# Altium footprint library PcbLib.PcbLib: 162 footprints (part 3 of 11)
Each footprint in its own frame and in the unit in brackets; x right, y up, seen from the top. Pads: shape width x height; smd on the part's side, far side on the other; paste and mask are expansions set on the pad; w line width, h text height; cw(c..) or ccw(c..) is an arc to the next point about the centre after c.
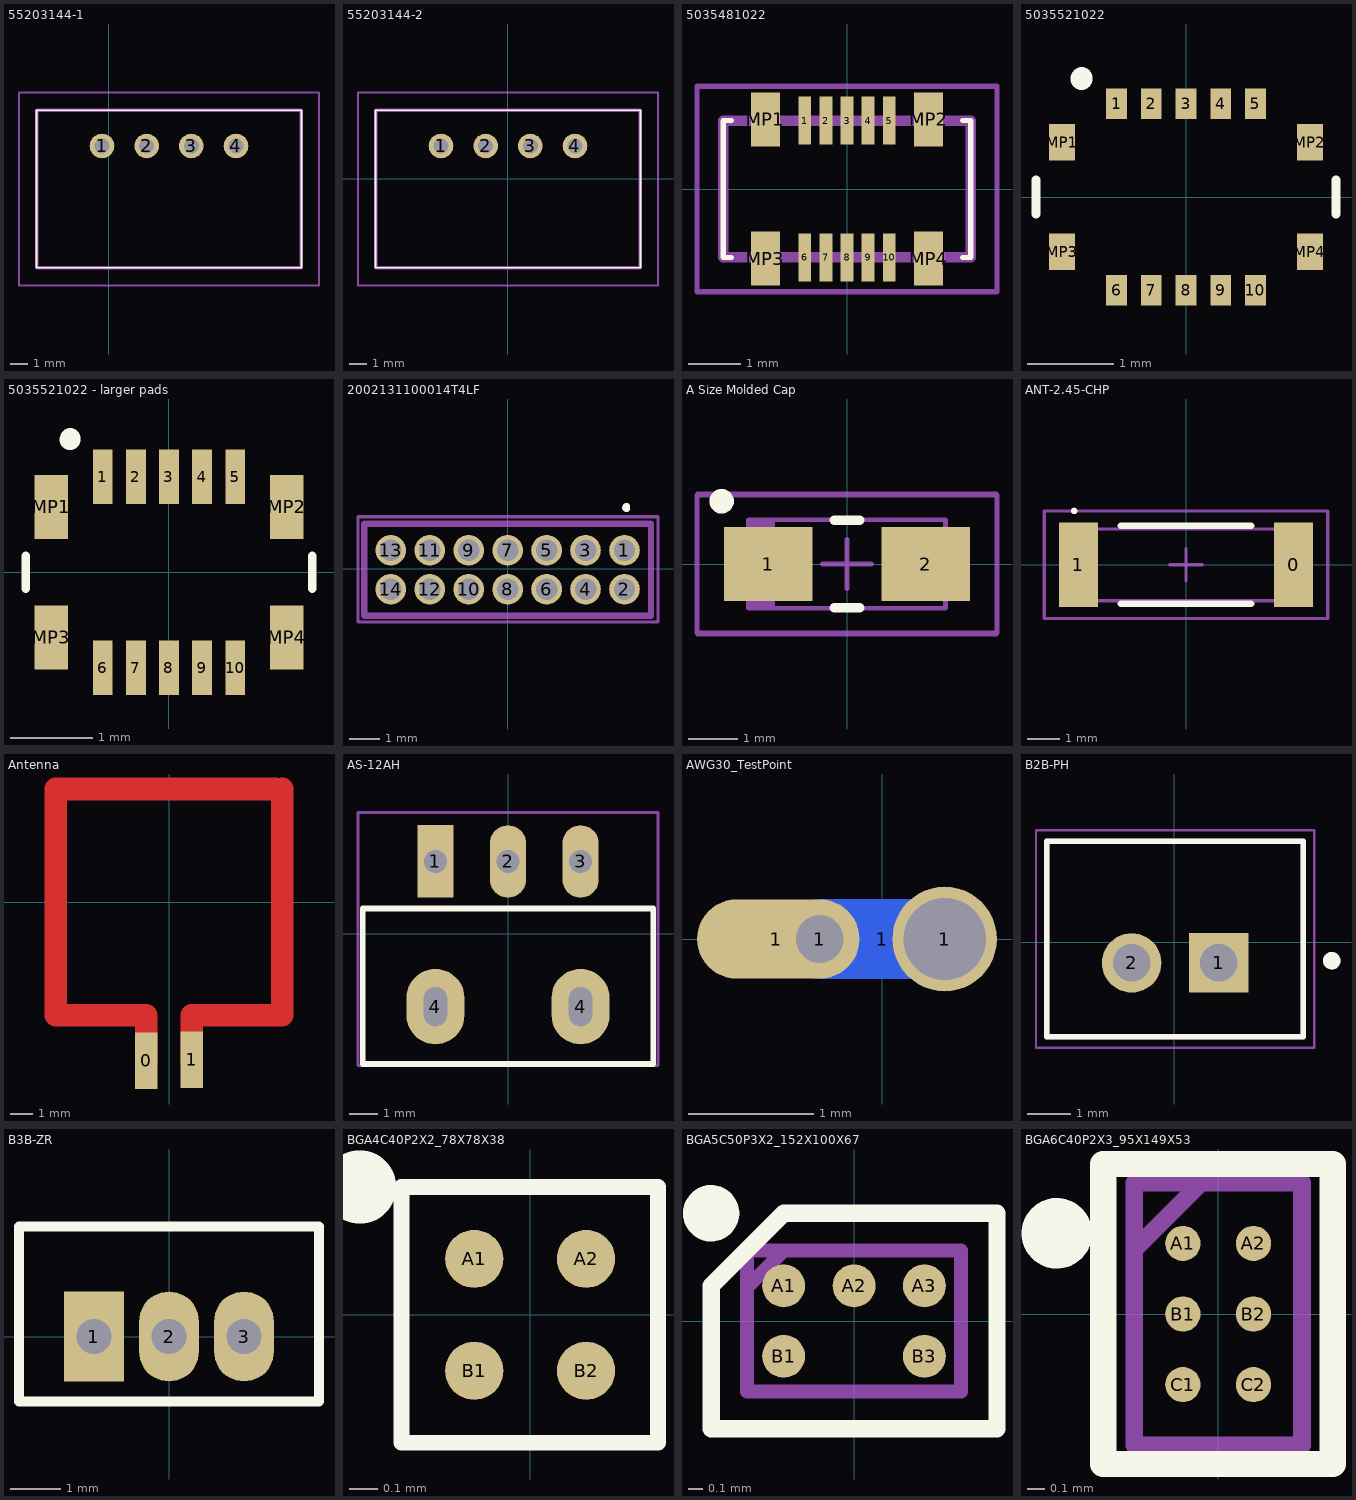
[diagram p2: the footprints below, top view; thin cyan lines are the x and y axes]

## 55203144-1 [mil]
pads (4):
  round 55 hole 33.86: 1(-15,-805) 2(85,-805) 3(185,-805) 4(285,-805)
Top Overlay:
  lines w3.94: -161.46,-1077.83 431.46,-1077.83 431.46,-724.84 -161.46,-724.84 -161.46,-1077.83
Mechanical 13:
  lines w7.87: -161.46,-1077.83 431.46,-1077.83 431.46,-724.84 -161.46,-724.84 -161.46,-1077.83
Mechanical 15:
  lines w3.94: -200.83,-1117.2 470.83,-1117.2 470.83,-685.47 -200.83,-685.47 -200.83,-1117.2
3D body "c-5-520314-4-y-3d.stp": height 173.5, standoff -99.5, extent -155.97,-1082.99 421.98,-725

## 55203144-2 [mil]
pads (4):
  round 55 hole 33.86: 1(-149,73) 2(-49,73) 3(51,73) 4(151,73)
Top Overlay:
  lines w3.94: -295.46,-199.83 297.46,-199.83 297.46,153.16 -295.46,153.16 -295.46,-199.83
Mechanical 13:
  lines w7.87: -295.46,-199.83 297.46,-199.83 297.46,153.16 -295.46,153.16 -295.46,-199.83
Mechanical 15:
  lines w3.94: -334.83,-239.2 336.83,-239.2 336.83,192.53 -334.83,192.53 -334.83,-239.2
3D body "DS1020-03RT1D--3DModel-STEP-56544.STEP": height 177.67, standoff -117.61, extent -206.48,-159.87 308.49,105.88

## 5035481022 [mm]
pads (14):
  rect 0.24x0.907 smd: 1(-0.8,1.301) 2(-0.4,1.301) 3(0,1.301) 4(0.4,1.301) 5(0.8,1.301) 6(-0.8,-1.301) 7(-0.4,-1.301) 8(0,-1.301) 9(0.4,-1.301) 10(0.8,-1.301)
  rect 0.551x1.029 smd: MP1(-1.549,1.321) MP2(1.549,1.321) MP3(-1.549,-1.321) MP4(1.549,-1.321)
Top Overlay:
  lines w0.1: -2.2,-1.3 -2.35,-1.3 -2.35,1.3 -2.2,1.3 ; 2.2,-1.3 2.35,-1.3 2.35,1.3 2.2,1.3
Mechanical 13:
  lines w0.2: -2.35,-1.3 -2.35,1.3 2.35,1.3 2.35,-1.3 -2.35,-1.3
Mechanical 15:
  lines w0.1: -2.85,-1.95 -2.85,1.95 2.85,1.95 2.85,-1.95 -2.85,-1.95
3D body "503548-1022.stp": height 0.68, standoff 0, extent -2.35,-1.3 2.35,1.3

## 5035521022 [mm]
pads (14):
  rect 0.24x0.35 smd mask+0.051: 1(-0.8,1.075) 2(-0.4,1.075) 3(0,1.075) 4(0.4,1.075) 5(0.8,1.075) 6(-0.8,-1.075) 7(-0.4,-1.075) 8(0,-1.075) 9(0.4,-1.075) 10(0.8,-1.075)
  rect 0.3x0.42 smd: MP1(-1.43,0.63) MP2(1.43,0.63) MP3(-1.43,-0.63) MP4(1.43,-0.63)
Top Overlay:
  lines w0.1: -1.73,-0.2 -1.73,0.2 ; 1.73,-0.2 1.73,0.2
  lines w0.25: -1.206,1.358 ccw(c-1.263,1.376) -1.204,1.376
3D body "503552-1022.stp": height 0.58, standoff 0, extent -1.73,-1.1 1.73,1.1

## 5035521022 - larger pads [mm]
pads (14):
  rect 0.24x0.655 smd mask+0.051: 1(-0.8,1.151) 2(-0.4,1.151) 3(0,1.151) 4(0.4,1.151) 5(0.8,1.151) 6(-0.8,-1.151) 7(-0.4,-1.151) 8(0,-1.151) 9(0.4,-1.151) 10(0.8,-1.151)
  rect 0.402x0.776 smd: MP1(-1.422,0.787) MP2(1.422,0.787) MP3(-1.422,-0.787) MP4(1.422,-0.787)
Top Overlay:
  lines w0.1: -1.73,-0.2 -1.73,0.2 ; 1.73,-0.2 1.73,0.2
  lines w0.25: -1.194,1.6 ccw(c-1.251,1.617) -1.191,1.617
3D body "503552-1022.stp": height 0.58, standoff 0, extent -1.73,-1.1 1.73,1.1

## 2002131100014T4LF [mm]
pads (14):
  round 1 hole 0.7: 1(3.81,0.61) 2(3.81,-0.66) 3(2.54,0.61) 4(2.54,-0.66) 5(1.27,0.61) 6(1.27,-0.66) 7(0,0.61) 8(0,-0.66) 9(-1.27,0.61) 10(-1.27,-0.66) 11(-2.54,0.61) 12(-2.54,-0.66) 13(-3.81,0.61) 14(-3.81,-0.66)
Top Overlay:
  lines w0.2: 3.886,1.952 cw(c3.886,2.002) 3.886,2.052 ; 3.886,1.952 cw(c3.886,2.002) 3.886,2.052 ; 3.886,1.952 3.886,2.052
Mechanical 13:
  lines w0.2: -4.675,-1.525 -4.675,1.475 4.675,1.475 4.675,-1.525 -4.675,-1.525
Mechanical 15:
  lines w0.1: -4.877,-1.727 -4.877,1.702 4.902,1.702 4.902,-1.727 -4.877,-1.727
3D body "20021311-0014XXLFc.stp": height 3.91, standoff -2.79, extent -4.688,-1.474 4.662,1.527

## A Size Molded Cap [mm] "Molded Capacitor, 2-Leads, Size A, IPC Low Density"
height 1.8
pads (2):
  rect 1.8x1.5 smd: 1(-1.6,0) 2(1.6,0)
Top Overlay:
  circle w0.25: c-2.55,1.275 r0.125
  lines w0.2: -0.254,-0.889 0.254,-0.889 ; -0.254,0.889 0.254,0.889
Mechanical 13:
  rectangle: -2,-0.9 -1.462,0.9
  lines w0.1: -2,-0.9 2,-0.9 2,0.9 -2,0.9 -2,-0.9
Mechanical 15:
  lines w0.05: -3.048,-1.45 3.048,-1.45 3.048,1.45 -3.048,1.45 -3.048,-1.45
  lines w0.1: -0.5,0 0.5,0 ; 0,-0.5 0,0.5
Mechanical 29:
  lines w0.1: -3.05,-1.4 3.05,-1.4 3.05,1.4 -3.05,1.4 -3.05,-1.4
3D body "SW3dPS-cap SMD Case A.STEP": height 1.6, standoff 0, extent -1.6,-0.8 1.6,0.8

## ANT-2.45-CHP [mm] "Chip Antenna, 2-Leads, Body 6.50x2.20mm, IPC Low Density"
height 1
pads (2):
  rect 1.2x2.6 smd: 0(3.3,0) 1(-3.3,0)
Top Overlay:
  circle w0.1: c-3.429,1.651 r0.05
  lines w0.2: -2,-1.2 2,-1.2 ; -2,1.2 2,1.2
Mechanical 13:
  lines w0.1: -3.048,-1.1 -3.048,1.1 3.175,1.1 3.175,-1.1 -3.048,-1.1
Mechanical 15:
  lines w0.05: -4.318,-1.651 -4.318,1.651 4.318,1.651 4.318,-1.651 -4.318,-1.651
  lines w0.1: -0.5,0 0.5,0 ; 0,-0.5 0,0.5
Mechanical 29:
  lines w0.1: -4.35,-1.65 -4.35,1.65 4.35,1.65 4.35,-1.65 -4.35,-1.65

## Antenna [mm]
pads (2):
  rect 1x2.5 smd: 0(-1,-7) 1(1,-6.95)
Top Layer:
  lines w1: -1,-7 -1,-5 -5,-5 -5,5 4.7,5 ; 1,-7 1,-5 5,-5 5,5

## AS-12AH [mil] "Right Angle Subminiator Slide Switch"
height 98.43
pads (5):
  rect 50x100 hole 32: 1(-100,100)
  oval 50x100 hole 32: 2(0,100) 3(100,100)
  rrect100% 80x104 hole 32 slot 54 at 90 deg: 4(-100,-100) 4(100,-100)
Top Overlay:
  lines w7.87: -200,-179.13 200,-179.13 200,35 -200,35 -200,-179.13
Mechanical 15:
  lines w3.94: -206.69,-37.4 -206.69,167.32 ; -206.69,167.32 -206.69,-181.1 206.69,-181.1 206.69,167.32 -206.69,167.32
3D body "as-13ah.stp": height 223.81, standoff -141.54, extent -192.92,-386.52 192.91,110.23

## AWG30_TestPoint [mil] "Test Point for AWG30 Wires"
height 20
pads (4):
  oval 50x25 smd: 1(-33.46,0)
  round 25 hole 15: 1(-19.68,0)
  oval 65x25 smd far side: 1(0,0)
  round 33 hole 26: 1(19.68,0)

## B2B-PH [mm] "Connector Header Through Hole 2 position 0.079 _2.00mm_"
pads (2):
  rect 1.368x1.368 hole 0.86: 1(1.026,-0.47)
  round 1.368 hole 0.86: 2(-0.974,-0.47)
Top Overlay:
  circle w0.2: c3.626,-0.42 r0.1
  lines w0.127: -2.924,-2.17 -2.924,2.33 2.976,2.33 2.976,-2.17 -2.924,-2.17
Mechanical 13:
  circle w0.2: c3.626,-0.42 r0.1
  lines w0.127: -2.924,-2.17 2.976,-2.17 2.976,2.33 -2.924,2.33 -2.924,-2.17
Mechanical 15:
  lines w0.05: -3.174,-2.42 3.226,-2.42 3.226,2.58 -3.174,2.58 -3.174,-2.42
3D body "B2B-PH-K-S(LF)(SN)--3DModel-STEP-56544.STEP": height 6.01, standoff -3.39, extent -2.95,-2.15 2.95,2.35

## B3B-ZR [mm] "Connector crimp style vertical, 1.5mm"
height 12
pads (3):
  rect 1.2x1.8 hole 0.7: 1(-1.5,0)
  oval 1.2x1.8 hole 0.7: 2(0,0) 3(1.5,0)
Top Overlay:
  lines w0.2: -3,-1.3 3,-1.3 3,2.2 -3,2.2 -3,-1.3
3D body "User Library-ZH1_5-3P.STEP": height 3.7, standoff -1.5, extent -3.8,-0.25 3.7,4.75

## BGA4C40P2X2_78X78X38 [mm]
pads (4):
  round 0.208 smd mask+0.064: A1(-0.2,0.2) A2(0.2,0.2) B1(-0.2,-0.2) B2(0.2,-0.2)
Top Overlay:
  circle w0.25: c-0.61,0.457 r0.006
  lines w0.056: -0.46,-0.457 -0.46,0.457 ; -0.457,-0.457 0.451,-0.457 ; -0.454,0.457 0.454,0.457 ; 0.457,-0.457 0.457,0.457
3D body "PMCM4401UNEZ.stp": height 0.38, standoff 0, extent -0.39,-0.39 0.39,0.39

## BGA5C50P3X2_152X100X67 [mm]
pads (5):
  round 0.305 smd mask+0.064: A1(-0.5,0.25) A2(0,0.25) A3(0.5,0.25) B1(-0.5,-0.25) B3(0.5,-0.25)
Top Overlay:
  circle w0.2: c-1.015,0.765 r0.1
  lines w0.124: -1.015,-0.765 1.015,-0.765 1.015,0.765 -0.5,0.765 -1.015,0.25 -1.015,-0.765
Mechanical 13:
  lines w0.1: -0.76,0.238 -0.498,0.5 ; -0.76,-0.5 0.76,-0.5 0.76,0.5 -0.76,0.5 -0.76,-0.5
3D body "MAX4372TEBT+T.stp": height 0.67, standoff 0, extent -0.76,-0.5 0.76,0.5

## BGA6C40P2X3_95X149X53 [mm]
pads (6):
  round 0.2 smd mask+0.064: A1(-0.2,0.4) A2(0.2,0.4) B1(-0.2,0) B2(0.2,0) C1(-0.2,-0.4) C2(0.2,-0.4)
Top Overlay:
  circle w0.2: c-0.914,0.457 r0.1
  lines w0.15: -0.65,-0.85 -0.65,0.85 0.65,0.85 0.65,-0.85 -0.65,-0.85
Mechanical 13:
  lines w0.1: -0.475,0.364 -0.095,0.744 ; -0.475,-0.744 -0.475,0.744 0.475,0.744 0.475,-0.744 -0.475,-0.744
3D body "TMP117AIYBGT.stp": height 0.53, standoff 0, extent -0.475,-0.744 0.475,0.744